# Altium footprint library DAPLink.PcbLib: 21 footprints (part 1 of 2)
Each footprint in its own frame and in the unit in brackets; x right, y up, seen from the top. Pads: shape width x height; smd on the part's side, far side on the other; paste and mask are expansions set on the pad; w line width, h text height; cw(c..) or ccw(c..) is an arc to the next point about the centre after c.
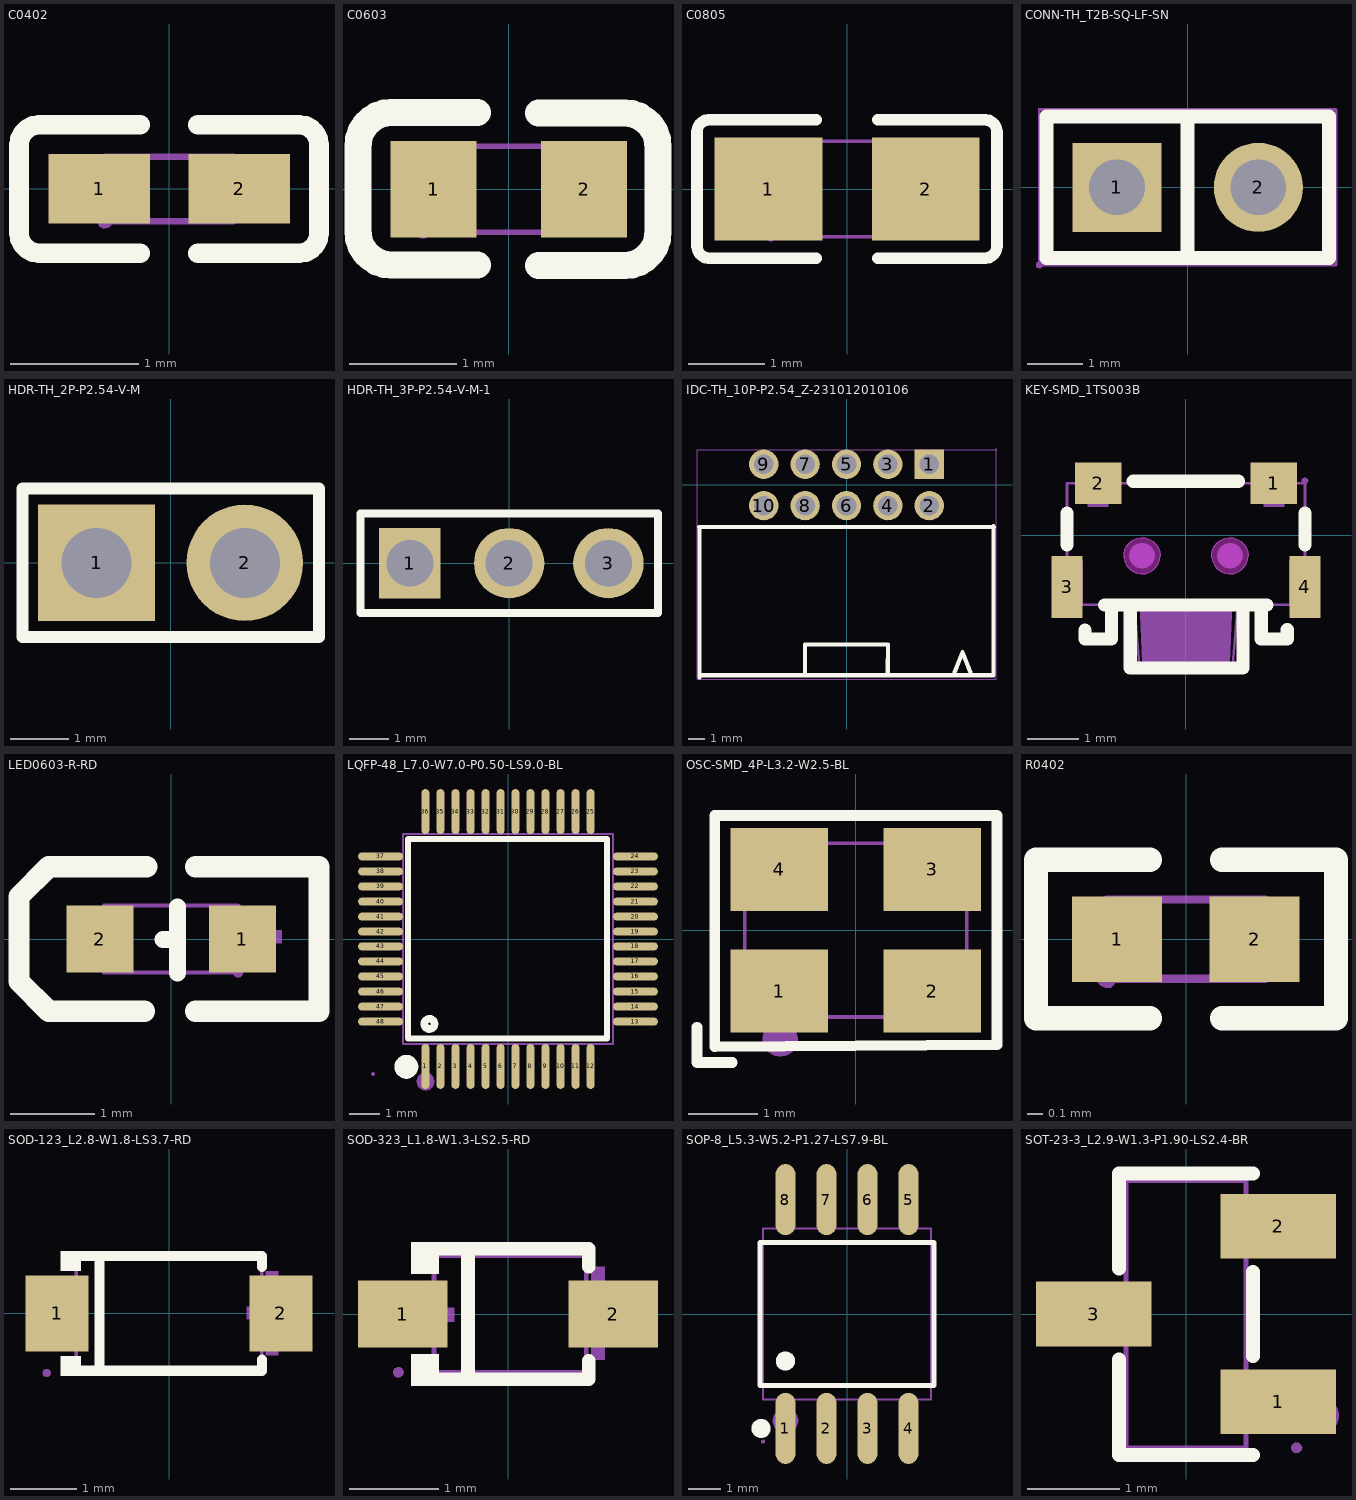
[diagram p0: the footprints below, top view; thin cyan lines are the x and y axes]

## C0402 [mil]
pads (2):
  rect 31.1x21.3 smd paste-3937 mask+2: 1(-21.4,0) 2(21.5,0)
Top Overlay:
  lines w6: -8.9,-19.7 -40,-19.7 -41.8,-19.4 -43.5,-18.5 -44.8,-17.2 -45.7,-15.5 -46,-13.7 -46,13.6 -45.7,15.4 -44.8,17.1 -43.5,18.4 -41.8,19.3 -40,19.6 -8.9,19.6 ; 8.9,-19.7 40,-19.7 41.9,-19.4 43.6,-18.5 44.9,-17.2 45.8,-15.5 46,-13.7 46,13.6 45.8,15.4 44.9,17.1 43.6,18.4 41.9,19.3 40,19.6 8.9,19.6
Top Paste:
  region: 30.7,8.8 30.7,-8.9 28.8,-10.9 9.9,-10.9 7.1,-8.9 7.1,8.8 9.9,10.8 28.8,10.8
  region: -7.1,8.8 -7.1,-8.9 -9.8,-10.9 -28.7,-10.9 -30.7,-8.9 -30.7,8.8 -28.7,10.8 -9.8,10.8
Mechanical 7:
  lines w2: -19.6,-9.9 19.7,-9.9 19.7,9.8 -19.6,9.8 -19.6,-9.9
Mechanical 8:
  region: -17.3,-9.9 -17.7,-11.2 -18.7,-12 -20,-12.2 -21.2,-11.7 -21.9,-10.5 -21.9,-9.2 -21.2,-8.1 -20,-7.5 -18.7,-7.7 -17.7,-8.6
Mechanical 9:
  region: 19.7,-9.9 19.7,9.8 9.9,9.8 9.9,-9.9
  region: -19.6,-9.9 -19.6,9.8 -9.8,9.8 -9.8,-9.9

## C0603 [mil]
pads (2):
  rect 31.5x35.4 smd paste+0 mask+2: 1(-27.6,0) 2(27.6,0)
Top Overlay:
  lines w10: -11.6,-27.7 -43.1,-27.7 -45.8,-27.4 -48.4,-26.5 -50.7,-25 -52.7,-23.1 -54.1,-20.8 -55,-18.2 -55.3,-15.5 -55.3,16 -55,18.7 -54.1,21.3 -52.7,23.6 -50.7,25.5 -48.4,27 -45.8,27.9 -43.1,28.2 -11.6,28.2 ; 11,-27.9 42.5,-27.9 45.2,-27.6 47.8,-26.7 50.1,-25.3 52.1,-23.3 53.5,-21 54.4,-18.4 54.7,-15.7 54.7,15.8 54.4,18.5 53.5,21.1 52.1,23.4 50.1,25.3 47.8,26.8 45.2,27.7 42.5,28 11,28
Mechanical 7:
  lines w2: -31.5,-15.7 -31.5,15.8 31.5,15.8 31.5,-15.7 -31.5,-15.7
Mechanical 8:
  region: -29.1,-15.7 -29.5,-17 -30.5,-17.9 -31.8,-18 -33,-17.5 -33.8,-16.4 -33.8,-15 -33,-13.9 -31.8,-13.4 -30.5,-13.6 -29.5,-14.4
Mechanical 9:
  region: -31.5,-15.7 -31.5,15.8 -19.7,15.8 -19.7,-15.7
  region: 31.5,-15.7 31.5,15.8 19.7,15.8 19.7,-15.7

## C0805 [mil]
pads (2):
  rect 55.5x53.1 smd paste-3937 mask+2: 1(-40.5,0) 2(40.6,0)
Top Overlay:
  lines w6: -15.8,-35.6 -71.3,-35.6 -73.2,-35.3 -74.8,-34.4 -76.2,-33.1 -77,-31.4 -77.3,-29.6 -77.3,29.6 -77,31.4 -76.2,33.1 -74.8,34.4 -73.2,35.3 -71.3,35.6 -15.8,35.6 ; 15.8,-35.6 71.3,-35.6 73.2,-35.3 74.8,-34.4 76.2,-33.1 77,-31.4 77.3,-29.6 77.3,29.6 77,31.4 76.2,33.1 74.8,34.4 73.2,35.3 71.3,35.6 15.8,35.6
Top Paste:
  region: 18.7,-24.4 18.7,-7.9 36.2,-7.9 36.2,9.8 18.9,9.8 18.7,26 20.7,27.9 65.9,27.9 67.9,26 67.9,-24.4 65.9,-26.4 20.7,-26.4
  region: -65.9,-24.4 -65.9,26 -64,27.9 -18.7,27.9 -16.7,26 -16.5,9.8 -34.3,9.8 -34.3,-7.9 -16.9,-7.9 -16.7,-24.4 -18.7,-26.4 -64,-26.4
Mechanical 7:
  lines w2: -39.4,-24.6 39.4,-24.6 39.4,24.6 -39.4,24.6 -39.4,-24.6
Mechanical 8:
  region: -37,-24.6 -37.4,-25.9 -38.4,-26.8 -39.7,-27 -40.9,-26.4 -41.6,-25.3 -41.6,-24 -40.9,-22.8 -39.7,-22.3 -38.4,-22.5 -37.4,-23.3
Mechanical 9:
  region: 39.4,24.6 39.4,-24.6 19.7,-24.6 19.7,24.6
  region: -39.4,-24.6 -39.4,24.6 -19.7,24.6 -19.7,-24.6

## CONN-TH_T2B-SQ-LF-SN [mil]
pads (2):
  rect 63x63 hole 39.4 paste-99999 mask+2: 1(-50,0)
  round 63 hole 39.4 paste-99999 mask+2: 2(50,0)
Top Overlay:
  lines w10: 0,-50 0,50 ; -100,-50 100,-50 100,50 -100,50 -100,-50
Mechanical 7:
  lines w2: -105,-55 105,-55 105,55 -105,55 -105,-55
Mechanical 8:
  region: -102.6,-55 -103,-56.3 -104,-57.2 -105.4,-57.4 -106.6,-56.8 -107.3,-55.7 -107.3,-54.3 -106.6,-53.2 -105.4,-52.6 -104,-52.8 -103,-53.7
Mechanical 9:
  region: -34.3,0 -34.7,-3.5 -35.9,-6.8 -37.7,-9.8 -40.2,-12.3 -43.2,-14.2 -46.5,-15.3 -50,-15.7 -53.5,-15.3 -56.8,-14.2 -59.8,-12.3 -62.3,-9.8 -64.2,-6.8 -65.3,-3.5 -65.7,0 -65.3,3.5 -64.2,6.8 -62.3,9.8 -59.8,12.3 -56.8,14.1 -53.5,15.3 -50,15.7 -46.5,15.3 -43.2,14.1 -40.2,12.3 -37.7,9.8 -35.9,6.8 -34.7,3.5
  region: 65.7,0 65.3,-3.5 64.1,-6.8 62.3,-9.8 59.8,-12.3 56.8,-14.2 53.5,-15.3 50,-15.7 46.5,-15.3 43.2,-14.2 40.2,-12.3 37.7,-9.8 35.8,-6.8 34.7,-3.5 34.3,0 34.7,3.5 35.8,6.8 37.7,9.8 40.2,12.3 43.2,14.1 46.5,15.3 50,15.7 53.5,15.3 56.8,14.1 59.8,12.3 62.3,9.8 64.1,6.8 65.3,3.5

## HDR-TH_2P-P2.54-V-M [mil]
pads (2):
  rect 78.7x78.7 hole 47.2 paste-99999 mask+2: 1(-50,0)
  round 78.7 hole 47.2 paste-99999 mask+2: 2(50,0)
Top Overlay:
  lines w8: -100,-50 -100,50 -25,50 100,50 100,-50 -100,-50
Mechanical 7:
  lines w2: -100,-49.3 100,-49.3 100,49.2 -100,49.2 -100,-49.3
Mechanical 8:
  region: -97.6,-49.3 -98,-50.5 -99,-51.4 -100.3,-51.6 -101.5,-51 -102.3,-49.9 -102.3,-48.6 -101.5,-47.5 -100.3,-46.9 -99,-47.1 -98,-48
Mechanical 9:
  region: -62.6,12.5 -37.4,12.5 -37.4,-12.6 -62.6,-12.6
  region: 37.4,12.5 62.6,12.5 62.6,-12.6 37.4,-12.6

## HDR-TH_3P-P2.54-V-M-1 [mil]
pads (3):
  rect 62x70.9 hole 47.2 paste-99999 mask+2: 1(-100,0)
  round 70.9 hole 47.2 paste-99999 mask+2: 2(0,0) 3(100,0)
Top Overlay:
  lines w8: -150,-50 150,-50 150,50 -75,50 -150,50 -150,-50
Mechanical 7:
  lines w2: -150,-49.2 150,-49.2 150,49.2 -150,49.2 -150,-49.2
Mechanical 8:
  region: -147.6,-49.2 -148,-50.5 -149,-51.4 -150.4,-51.6 -151.6,-51.1 -152.3,-49.9 -152.3,-48.6 -151.6,-47.4 -150.4,-46.9 -149,-47.1 -148,-47.9
Mechanical 9:
  region: -112.6,12.6 -87.4,12.6 -87.4,-12.6 -112.6,-12.6
  region: -12.6,12.6 12.6,12.6 12.6,-12.6 -12.6,-12.6
  region: 87.4,12.6 112.6,12.6 112.6,-12.6 87.4,-12.6

## IDC-TH_10P-P2.54_Z-231012010106 [mil]
pads (10):
  rect 70.9x70.9 hole 47.2 paste-99999 mask+2: 1(200,50)
  round 70.9 hole 47.2 paste-99999 mask+2: 2(200,-50) 3(100,50) 4(100,-50) 5(0,50) 6(0,-50) 7(-100,50) 8(-100,-50) 9(-200,50) 10(-200,-50)
Top Overlay:
  lines w10: -356.3,-102 356.3,-102 ; -355,-465 -355,-105 ; -355,-460 355,-460 355,-100 ; -100,-455 -100,-385.7 100,-385.7 99.6,-452.6 ; 260.6,-453.7 280.3,-404.5 300,-453.7
Mechanical 7:
  lines w2: -361.3,-470 -361.3,85.4 361.3,85.4 361.3,-470 -361.3,-470
Mechanical 8:
  region: 363.7,85.4 363.3,84.1 362.2,83.2 360.9,83.1 359.7,83.6 358.9,84.8 358.9,86.1 359.7,87.2 360.9,87.8 362.2,87.6 363.3,86.7
Mechanical 9:
  drawing of 10 lines, arcs and shapes, not listed

## KEY-SMD_1TS003B [mil]
pads (4):
  rect 35.4x31.5 smd paste+0 mask+2: 1(67,39.4) 2(-66.9,39.4)
  rect 23.6x47.2 smd paste+0 mask+2: 3(-90.5,-39.4) 4(90.6,-39.4)
Top Overlay:
  lines w10: -90.6,-7.6 -90.6,16.8 ; -76.8,-72.4 -76.7,-79.1 -56.7,-79.1 -56.7,-59.1 ; -61.9,-53.2 -57.1,-53.2 -35.6,-53.2 61.6,-53.2 ; -42.4,-53.2 -42.4,-101.2 40.6,-101.2 43.3,-101.2 43.3,-53.2 ; -40.1,40.9 40.1,40.9 ; 57.3,-59.1 57.3,-79.1 77.3,-79.1 77.1,-72.1 ; 90.6,-7.6 90.6,16.8
Keep-Out Layer:
  board cut-out: 47.3,-15.8 46.9,-18.9 45.8,-21.9 44.1,-24.6 41.7,-26.8 39,-28.4 35.9,-29.3 32.7,-29.5 29.5,-29 26.6,-27.7 24,-25.8 22,-23.3 20.5,-20.5 19.8,-17.4 19.8,-14.2 20.5,-11 22,-8.2 24,-5.7 26.6,-3.8 29.5,-2.6 32.7,-2 35.9,-2.2 39,-3.1 41.7,-4.7 44.1,-6.9 45.8,-9.6 46.9,-12.6
  board cut-out: -19.7,-15.8 -20,-18.9 -21.1,-21.9 -22.9,-24.6 -25.2,-26.8 -28,-28.4 -31,-29.3 -34.2,-29.5 -37.4,-29 -40.3,-27.7 -42.9,-25.8 -44.9,-23.3 -46.4,-20.5 -47.1,-17.4 -47.1,-14.2 -46.4,-11.1 -44.9,-8.2 -42.9,-5.7 -40.3,-3.8 -37.4,-2.6 -34.2,-2 -31,-2.2 -28,-3.1 -25.2,-4.7 -22.9,-6.9 -21.1,-9.6 -20,-12.6
Keep-Out Layer:
  drawing of 58 lines, arcs and shapes, not listed
Mechanical 1:
  lines w0.1: -47.1,-17.4 -47.1,-14.2 -46.4,-11.1 -44.9,-8.2 -42.9,-5.7 -40.3,-3.8 -37.4,-2.6 -34.2,-2 -31,-2.2 -28,-3.1 -25.2,-4.7 -22.9,-6.9 -21.1,-9.6 -20,-12.6 -19.7,-15.8 -20,-18.9 -21.1,-21.9 -22.9,-24.6 -25.2,-26.8 -28,-28.4 -31,-29.3 -34.2,-29.5 -37.4,-29 -40.3,-27.7 -42.9,-25.8 -44.9,-23.3 -46.4,-20.5 -47.1,-17.4 ; 19.8,-17.4 19.8,-14.2 20.5,-11 22,-8.2 24,-5.7 26.6,-3.8 29.5,-2.6 32.7,-2 35.9,-2.2 39,-3.1 41.7,-4.7 44.1,-6.9 45.8,-9.6 46.9,-12.6 47.3,-15.8 46.9,-18.9 45.8,-21.9 44.1,-24.6 41.7,-26.8 39,-28.4 35.9,-29.3 32.7,-29.5 29.5,-29 26.6,-27.7 24,-25.8 22,-23.3 20.5,-20.5 19.8,-17.4
Mechanical 6:
  region: 33.1,-98 32.3,-98.4 -32.3,-98.4 -33.4,-97.6 -35,-51.2 35.1,-51.2 33.5,-97.6 33.1,-98
  lines w9.8: -38.4,-15.8 -38,-13.9 -36.9,-12.3 -35.3,-11.2 -33.4,-10.8 -31.6,-11.2 -30,-12.3 -28.9,-13.9 -28.5,-15.8 -28.9,-17.6 -30,-19.2 -31.6,-20.3 -33.4,-20.7 -35.3,-20.3 -36.9,-19.2 -38,-17.6 -38.4,-15.8 ; 28.6,-15.8 28.9,-13.9 30,-12.3 31.6,-11.2 33.5,-10.8 35.4,-11.2 37,-12.3 38,-13.9 38.4,-15.8 38,-17.6 37,-19.2 35.4,-20.3 33.5,-20.7 31.6,-20.3 30,-19.2 28.9,-17.6 28.6,-15.8
Mechanical 7:
  lines w2: -90.5,-53.2 -39.3,-53.2 -35.4,-98.4 35.5,-98.4 39.4,-53.2 90.6,-53.2 90.6,39.4 -90.5,39.4 -90.5,-53.2
Mechanical 8:
  region: 92.9,41.3 92.6,40.1 91.6,39.2 90.2,39 89,39.6 88.3,40.7 88.3,42 89,43.1 90.2,43.7 91.6,43.5 92.6,42.6
Mechanical 9:
  region: -78.7,-53.2 -90.5,-53.2 -90.5,-19.7 -78.7,-19.7
  region: 90.6,-53.2 78.8,-53.2 78.8,-19.7 90.6,-19.7
  region: -74.8,41.3 -59,41.3 -59,21.7 -74.8,21.7
  region: 59.1,41.3 74.8,41.3 74.8,21.7 59.1,21.7

## LED0603-R-RD [mil]
pads (2):
  rect 31.5x31.5 smd paste+0 mask+2: 1(33.5,0) 2(-33.5,0)
Top Overlay:
  lines w8: -3.9,-0.3 3,-0.3 ; 3,-16 3,15
  lines w10: -12.5,-34 -57.5,-34 -71.5,-20 -71.5,20 -57.5,34 -11.5,34 ; 11.5,-34 69.5,-34 69.5,34 11.5,34
Mechanical 6:
  region: -47,1.9 -21,1.9 -21,-4.1 -47,-4.1
  region: 36.8,-10.8 36.8,15.2 42.8,15.2 42.8,-10.8
  region: 26,4 52,4 52,-2 26,-2
Mechanical 7:
  lines w2: -31.5,-15.8 -31.5,15.7 31.5,15.7 31.5,-15.8 -31.5,-15.8
Mechanical 8:
  region: 33.9,-15.8 33.5,-17 32.5,-17.9 31.2,-18.1 30,-17.5 29.2,-16.4 29.2,-15.1 30,-14 31.2,-13.4 32.5,-13.6 33.5,-14.5
Mechanical 9:
  region: -31.5,-15.8 -31.5,15.7 -19.7,15.7 -19.7,-15.8
  region: 31.5,15.7 31.5,-15.8 19.7,-15.8 19.7,15.7

## LQFP-48_L7.0-W7.0-P0.50-LS9.0-BL [mil]
pads (48):
  oval 10.6x59.1 smd paste+0 mask+2: 1(-108.3,-167.3) 2(-88.6,-167.3) 3(-68.9,-167.3) 4(-49.2,-167.3) 5(-29.5,-167.3) 6(-9.8,-167.3) 7(9.8,-167.3) 8(29.5,-167.3) 9(49.2,-167.3) 10(68.9,-167.3) 11(88.6,-167.3) 12(108.3,-167.3) 25(108.3,167.3) 26(88.6,167.3) 27(68.9,167.3) 28(49.2,167.3) 29(29.5,167.3) 30(9.8,167.3) 31(-9.8,167.3) 32(-29.5,167.3) 33(-49.2,167.3) 34(-68.9,167.3) 35(-88.6,167.3) 36(-108.3,167.3)
  oval 59.1x10.6 smd paste+0 mask+2: 13(167.3,-108.3) 14(167.3,-88.6) 15(167.3,-68.9) 16(167.3,-49.2) 17(167.3,-29.5) 18(167.3,-9.8) 19(167.3,9.8) 20(167.3,29.5) 21(167.3,49.2) 22(167.3,68.9) 23(167.3,88.6) 24(167.3,108.3) 37(-167.3,108.3) 38(-167.3,88.6) 39(-167.3,68.9) 40(-167.3,49.2) 41(-167.3,29.5) 42(-167.3,9.8) 43(-167.3,-9.8) 44(-167.3,-29.5) 45(-167.3,-49.2) 46(-167.3,-68.9) 47(-167.3,-88.6) 48(-167.3,-108.3)
Top Overlay:
  lines w7.9: -114,131.5 130,131.5 130,-130.5 -131,-130.5 -131,131.5 -101,131.5
  lines w10: -109.7,-112.5 -109.7,-110.3 -108.9,-108.2 -107.6,-106.5 -105.7,-105.3 -103.6,-104.7 -101.4,-104.9 -99.4,-105.8 -97.8,-107.3 -96.7,-109.2 -96.4,-111.4 -96.7,-113.6 -97.8,-115.5 -99.4,-117 -101.4,-117.9 -103.6,-118.1 -105.7,-117.5 -107.6,-116.3 -108.9,-114.6 -109.7,-112.5
  lines w15.7: -133.4,-159.8 -135.8,-160.2 -138,-161.4 -139.8,-163.1 -140.9,-165.3 -141.2,-167.7 -140.8,-170.2 -139.7,-172.4 -138,-174.1 -135.8,-175.2 -133.4,-175.6 -130.9,-175.2 -128.7,-174.1 -127,-172.4 -125.9,-170.2 -125.5,-167.7 -125.9,-165.3 -127,-163.1 -128.7,-161.4 -130.9,-160.2 -133.3,-159.8
Mechanical 6:
  lines w11.8: -114.2,-187 -113.8,-185 -112.8,-183.2 -111.2,-181.9 -109.3,-181.2 -107.2,-181.2 -105.3,-181.9 -103.7,-183.2 -102.7,-185 -102.4,-187 -102.7,-189 -103.7,-190.8 -105.3,-192.1 -107.2,-192.8 -109.3,-192.8 -111.2,-192.1 -112.8,-190.8 -113.8,-189 -114.2,-187
Mechanical 7:
  lines w2: -137.8,-137.8 -137.8,137.8 137.8,137.8 137.8,-137.8 -137.8,-137.8
Mechanical 8:
  region: -174.8,-177.2 -175.1,-178.5 -176.2,-179.4 -177.5,-179.6 -178.7,-179 -179.5,-177.9 -179.5,-176.5 -178.7,-175.4 -177.5,-174.8 -176.2,-175 -175.1,-175.9
Mechanical 9:
  drawing of 48 lines, arcs and shapes, not listed
Mechanical 10:
  drawing of 48 lines, arcs and shapes, not listed

## OSC-SMD_4P-L3.2-W2.5-BL [mil]
pads (4):
  rect 55.1x47.2 smd paste+0 mask+2: 1(-43.4,-34.5) 2(43.3,-34.5) 3(43.3,34.4) 4(-43.4,34.4)
Top Overlay:
  lines w6: -90,-55 -90,-75 -70,-75 ; -79.9,-66.1 80,-65 80,0 80,65 -79.9,65 -79.9,-66.1
Mechanical 6:
  region: -68.5,-21.1 -67.1,-21.1 -67.1,-24 -68.5,-24
  region: -67.1,-21.1 -65.6,-21.1 -65.6,-24 -67.1,-24
  region: -65.6,-19.7 -64.2,-19.7 -64.2,-24 -65.6,-24
  region: -64.2,-18.3 -62.8,-18.3 -62.8,-22.6 -64.2,-22.6
  region: -62.8,-18.3 -61.4,-18.3 -61.4,-39.6 -62.8,-39.6
  region: -61.4,-16.9 -60,-16.9 -60,-39.6 -61.4,-39.6
  region: -60,-16.9 -58.6,-16.9 -58.6,-39.6 -60,-39.6
  region: -58.6,-16.9 -57.1,-16.9 -57.1,-39.6 -58.6,-39.6
  lines w10: -47.9,-61.7 -47.5,-59.8 -46.4,-58.2 -44.8,-57.1 -42.9,-56.7 -41,-57.1 -39.3,-58.2 -38.3,-59.8 -37.9,-61.7 -38.3,-63.6 -39.3,-65.3 -41,-66.4 -42.9,-66.7 -44.8,-66.4 -46.4,-65.3 -47.5,-63.6 -47.9,-61.7
Mechanical 7:
  lines w2: -63,-49.2 62.9,-49.2 62.9,49.2 -63,49.2 -63,-49.2
Mechanical 8:
  region: -60.7,-49.2 -61.1,-50.5 -62.1,-51.4 -63.4,-51.6 -64.6,-51 -65.3,-49.9 -65.3,-48.6 -64.6,-47.5 -63.4,-46.9 -62.1,-47.1 -61.1,-48
Mechanical 9:
  region: 23.6,-17.7 59,-17.7 59,-49.2 23.6,-49.2
  region: -59.1,-17.7 -23.7,-17.7 -23.7,-49.2 -59.1,-49.2
  region: -59.1,49.1 -23.7,49.1 -23.7,17.6 -59.1,17.6
  region: 23.6,49.1 59,49.1 59,17.6 23.6,17.6

## R0402 [mil]
pads (2):
  rect 22.3x21.3 smd paste-3937 mask+2: 1(-17.1,0) 2(17,0)
Top Overlay:
  lines w6: -8.9,-19.6 -37.2,-19.6 -37.2,19.7 -8.9,19.7 ; 8.9,-19.6 37.2,-19.6 37.2,19.7 8.9,19.7
Top Paste:
  region: -5.3,-9 -5.3,9.1 -6.9,10.7 -26.6,10.7 -28.2,9.1 -28.2,-9 -26.6,-10.6 -6.9,-10.6
  region: 5.3,-9 5.3,9.1 6.9,10.7 26.6,10.7 28.2,9.1 28.2,-9 26.6,-10.6 6.9,-10.6
Mechanical 7:
  lines w2: -19.7,-9.8 19.7,-9.8 19.7,9.9 -19.7,9.9 -19.7,-9.8
Mechanical 8:
  region: -17.3,-9.8 -17.7,-11.1 -18.7,-12 -20,-12.1 -21.2,-11.6 -22,-10.5 -22,-9.1 -21.2,-8 -20,-7.5 -18.7,-7.7 -17.7,-8.5
Mechanical 9:
  region: -9.8,9.9 -9.8,-9.8 -19.7,-9.8 -19.7,9.9
  region: 9.9,-9.8 9.9,9.9 19.7,9.9 19.7,-9.8

## SOD-123_L2.8-W1.8-LS3.7-RD [mil]
pads (2):
  rect 37.4x45.3 smd paste+0 mask+2: 1(-66.6,0) 2(66.6,0)
Top Overlay:
  region: -52.4,-37.1 -52.4,-25.5 -64.4,-25.5 -64.4,-37.1
  region: -52.4,37.1 -52.4,25.5 -64.4,25.5 -64.4,37.1
  lines w6: -55.4,-34.1 55.4,-34.1 55.4,-27.5 ; -55.4,34.1 55.4,34.1 55.4,27.5 ; -41.3,-34.1 -41.3,34.1
Mechanical 6:
  region: 65,25 65,-24.8 57.5,-24.8 57.5,25
  region: 76.2,3.9 76.2,-3.6 46.3,-3.6 46.3,3.9
  region: -79.9,3.7 -79.9,-3.7 -50.1,-3.7 -50.1,3.7
Mechanical 7:
  lines w2: -55.1,-35.4 55.1,-35.4 55.1,35.4 -55.1,35.4 -55.1,-35.4
Mechanical 8:
  region: -70.5,-35.4 -70.8,-36.7 -71.9,-37.6 -73.2,-37.8 -74.4,-37.3 -75.2,-36.1 -75.2,-34.8 -74.4,-33.6 -73.2,-33.1 -71.9,-33.3 -70.8,-34.1
Mechanical 9:
  region: 72.9,-18.3 72.9,18.3 51.2,18.3 51.2,-18.3
  region: -72.9,-18.3 -72.9,18.3 -51.2,18.3 -51.2,-18.3

## SOD-323_L1.8-W1.3-LS2.5-RD [mil]
pads (2):
  rect 39.4x29.5 smd paste+0 mask+2: 1(-46.2,0) 2(46.2,0)
Top Overlay:
  region: -30.5,-31.6 -30.5,-17.7 -42.5,-17.7 -42.5,-31.6
  region: -30.5,31.6 -30.5,17.7 -42.5,17.7 -42.5,31.6
  lines w6: -33.5,-28.6 35.5,-28.6 35.5,-20.5 ; -33.5,28.6 35.5,28.6 35.5,20.8 ; -17.6,-28.6 -17.6,28.6
Mechanical 6:
  region: 42.6,20.8 42.6,-20.1 36.5,-20.1 36.5,20.8
  region: 51.8,3.5 51.8,-2.6 27.2,-2.6 27.2,3.5
  region: -48.2,2.7 -48.2,-3.4 -23.7,-3.4 -23.7,2.7
Mechanical 7:
  lines w2: -32.5,-25.6 -32.5,25.6 34.4,25.6 34.4,-25.6 -32.5,-25.6
Mechanical 8:
  region: -45.9,-25.6 -46.2,-26.9 -47.3,-27.8 -48.6,-27.9 -49.8,-27.4 -50.5,-26.3 -50.5,-24.9 -49.8,-23.8 -48.6,-23.3 -47.3,-23.5 -46.2,-24.3
Mechanical 9:
  region: -36.4,6.3 -36.4,-6.3 -48.2,-6.3 -48.2,6.3
  region: 50.2,6.3 50.2,-6.3 38.4,-6.3 38.4,6.3
Mechanical 10:
  region: -32.1,6.3 -32.1,-6.3 -36.8,-6.3 -36.8,6.3
  region: 38.8,6.3 38.8,-6.3 34,-6.3 34,6.3

## SOP-8_L5.3-W5.2-P1.27-LS7.9-BL [mil]
pads (8):
  oval 24x86.8 smd paste+0 mask+2: 1(-75,-139.5) 2(-25,-139.5) 3(25,-139.5) 4(75,-139.5) 5(75,139.5) 6(25,139.5) 7(-25,139.5) 8(-75,139.5)
Top Overlay:
  lines w6: -106,-87.1 106,-87.1 106,87.1 -106,87.1 -106,-87.1
  lines w11.8: -110.7,-139.5 -110.4,-137.5 -109.3,-135.7 -107.8,-134.4 -105.8,-133.7 -103.8,-133.7 -101.9,-134.4 -100.3,-135.7 -99.3,-137.5 -98.9,-139.5 -99.3,-141.5 -100.3,-143.3 -101.9,-144.6 -103.8,-145.3 -105.8,-145.3 -107.8,-144.6 -109.3,-143.3 -110.4,-141.5 -110.7,-139.5 ; -80.9,-57.4 -80.6,-55.4 -79.5,-53.6 -78,-52.3 -76,-51.6 -74,-51.6 -72.1,-52.3 -70.5,-53.6 -69.5,-55.4 -69.1,-57.4 -69.5,-59.4 -70.5,-61.2 -72.1,-62.5 -74,-63.2 -76,-63.2 -78,-62.5 -79.5,-61.2 -80.6,-59.4 -80.9,-57.4
Mechanical 6:
  lines w15.7: -82.9,-130 -82.5,-127.6 -81.4,-125.4 -79.7,-123.6 -77.5,-122.5 -75,-122.1 -72.6,-122.5 -70.4,-123.6 -68.6,-125.4 -67.5,-127.6 -67.1,-130 -67.5,-132.4 -68.6,-134.6 -70.4,-136.4 -72.6,-137.5 -75,-137.9 -77.5,-137.5 -79.7,-136.4 -81.4,-134.6 -82.5,-132.4 -82.9,-130
Mechanical 7:
  lines w2: -102.4,-104.3 -102.4,104.3 102.4,104.3 102.4,-104.3 -102.4,-104.3
Mechanical 8:
  region: -100,-155.5 -100.4,-156.8 -101.4,-157.7 -102.8,-157.9 -104,-157.3 -104.7,-156.2 -104.7,-154.8 -104,-153.7 -102.8,-153.1 -101.4,-153.3 -100.4,-154.2
Mechanical 9:
  region: -83.6,-155.5 -83.6,-129.9 -66.4,-129.9 -66.4,-155.5
  region: -33.6,-155.5 -33.6,-129.9 -16.4,-129.9 -16.4,-155.5
  region: 16.4,-155.5 16.4,-129.9 33.6,-129.9 33.6,-155.5
  region: 66.4,-155.5 66.4,-129.9 83.6,-129.9 83.6,-155.5
  region: -83.6,155.5 -83.6,129.9 -66.4,129.9 -66.4,155.5
  region: -33.6,155.5 -33.6,129.9 -16.4,129.9 -16.4,155.5
  region: 16.4,155.5 16.4,129.9 33.6,129.9 33.6,155.5
  region: 66.4,155.5 66.4,129.9 83.6,129.9 83.6,155.5
Mechanical 10:
  region: -83.6,-130.3 -83.6,-103.5 -66.4,-103.5 -66.4,-130.3
  region: -33.6,-130.3 -33.6,-103.5 -16.4,-103.5 -16.4,-130.3
  region: 16.4,-130.3 16.4,-103.5 33.6,-103.5 33.6,-130.3
  region: 66.4,-130.3 66.4,-103.5 83.6,-103.5 83.6,-130.3
  region: -83.6,130.3 -83.6,103.5 -66.4,103.5 -66.4,130.3
  region: -33.6,130.3 -33.6,103.5 -16.4,103.5 -16.4,130.3
  region: 16.4,130.3 16.4,103.5 33.6,103.5 33.6,130.3
  region: 66.4,130.3 66.4,103.5 83.6,103.5 83.6,130.3

## SOT-23-3_L2.9-W1.3-P1.90-LS2.4-BR [mil]
pads (3):
  rect 49.2x27.6 smd paste+0 mask+2: 1(39.4,-37.4) 2(39.4,37.4) 3(-39.4,0)
Top Overlay:
  lines w6: -28.6,-19.5 -28.6,-60.1 28.6,-60.1 ; -28.6,19.4 -28.6,60 28.6,60 ; 28.6,-18 28.6,17.9
Mechanical 6:
  lines w7.9: 53.5,-43.4 53.9,-41.7 55,-40.3 56.6,-39.5 58.4,-39.5 59.9,-40.3 61,-41.7 61.4,-43.4 61,-45.1 59.9,-46.4 58.4,-47.2 56.6,-47.2 55,-46.4 53.9,-45.1 53.5,-43.4
Mechanical 7:
  lines w2: -25.6,-57.1 25.6,-57.1 25.6,57 -25.6,57 -25.6,-57.1
Mechanical 8:
  region: 49.6,-57.1 49.2,-58.4 48.2,-59.3 46.9,-59.5 45.7,-58.9 45,-57.8 45,-56.5 45.7,-55.4 46.9,-54.8 48.2,-55 49.2,-55.9
Mechanical 9:
  region: -47.2,-8.5 -47.2,8.4 -35.4,8.4 -35.4,-8.5
  region: 35.4,-45.9 35.4,-29 47.2,-29 47.2,-45.9
  region: 35.4,28.9 35.4,45.8 47.2,45.8 47.2,28.9
Mechanical 10:
  region: -35.8,-8.5 -35.8,8.4 -25.2,8.4 -25.2,-8.5
  region: 25.2,-45.9 25.2,-29 35.8,-29 35.8,-45.9
  region: 25.2,28.9 25.2,45.8 35.8,45.8 35.8,28.9